# Altium footprint library basicfootprints.PcbLib: 522 footprints (part 4 of 33)
Each footprint in its own frame and in the unit in brackets; x right, y up, seen from the top. Pads: shape width x height; smd on the part's side, far side on the other; paste and mask are expansions set on the pad; w line width, h text height; cw(c..) or ccw(c..) is an arc to the next point about the centre after c.
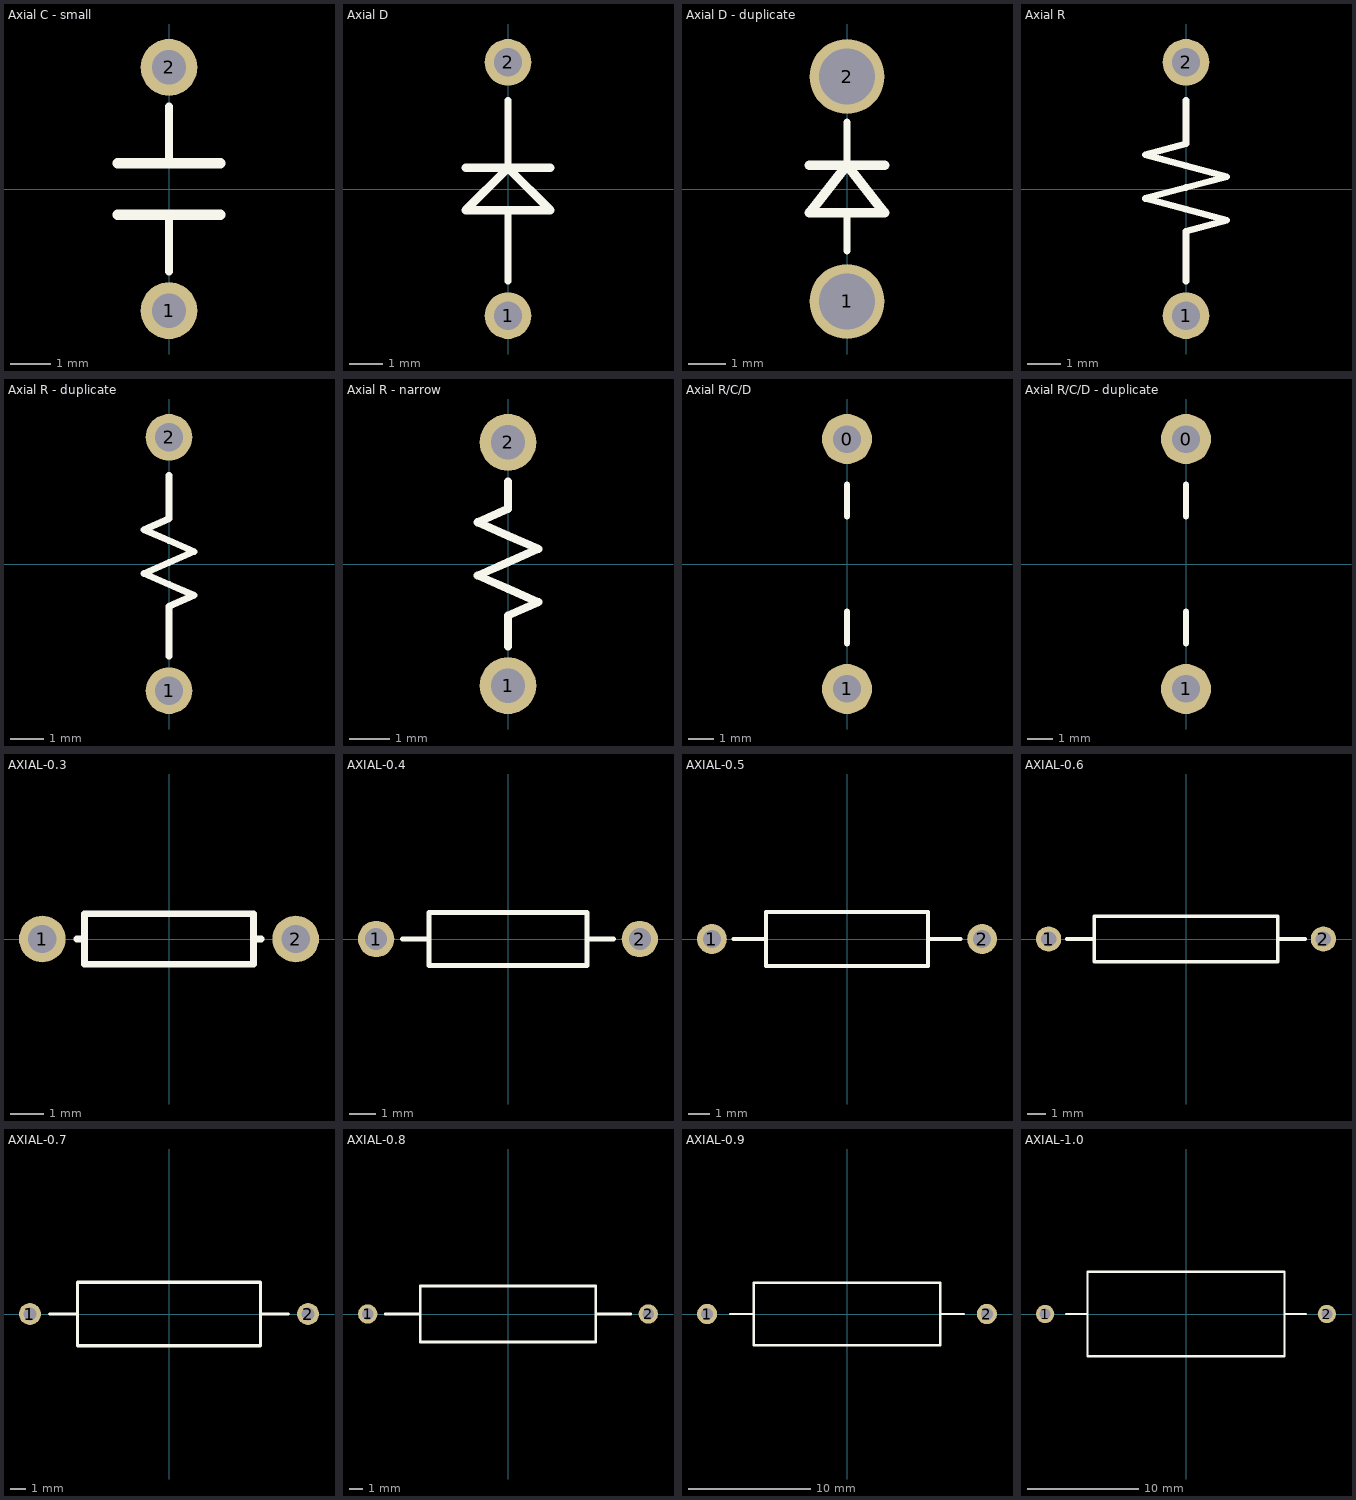
[diagram p3: the footprints below, top view; thin cyan lines are the x and y axes]

## Axial C - small [mm]
pads (2):
  round 1.4 hole 0.85: 1(0,-3) 2(0,3)
Top Overlay:
  lines w0.2: 0,-2.032 0,-0.635 ; 0,0.635 0,2.032
  lines w0.254: -1.27,-0.635 1.27,-0.635 ; -1.27,0.635 1.27,0.635

## Axial D [mm]
pads (2):
  round 1.4 hole 0.85: 1(0,-3.81) 2(0,3.81)
Top Overlay:
  lines w0.2: 0,-2.769 0,-0.635 ; 0,0.635 0,2.667
  lines w0.254: -1.27,0.635 1.27,0.635 ; -1.27,-0.635 0,0.635 1.27,-0.635 -1.27,-0.635

## Axial D - duplicate [mm]
pads (2):
  round 2 hole 1.5: 1(0,-3) 2(0,3)
Top Overlay:
  lines w0.2: 0,-1.651 0,-0.635 ; 0,0.635 0,1.778
  lines w0.254: -1,0.635 1,0.635 ; -1,-0.635 0,0.635 1,-0.635 -1,-0.635

## Axial R [mm]
pads (2):
  round 1.4 hole 0.85: 1(0,-3.81) 2(0,3.81)
Top Overlay:
  lines w0.2: 0,-2.769 0,-1.27 1.227,-0.941 0,-0.613 -1.227,-0.284 0,0.045 1.227,0.373 0,0.702 -1.227,1.031 0,1.36 0,2.667

## Axial R - duplicate [mm]
pads (2):
  round 1.4 hole 0.85: 1(0,-3.81) 2(0,3.81)
Top Overlay:
  lines w0.2: 0,-2.769 0,-1.27 0.75,-0.941 0,-0.613 -0.75,-0.284 0,0.045 0.75,0.373 0,0.702 -0.75,1.031 0,1.36 0,2.667

## Axial R - narrow [mm]
pads (2):
  round 1.4 hole 0.85: 1(0,-3) 2(0,3)
Top Overlay:
  lines w0.2: 0,-2.032 0,-1.27 0.75,-0.941 0,-0.613 -0.75,-0.284 0,0.045 0.75,0.373 0,0.702 -0.75,1.031 0,1.36 0,2.032

## Axial R/C/D [mm] "Through-Hole FootPrint"
pads (2):
  round 2 hole 1.1: 0(0,5) 1(0,-5)
Top Overlay:
  lines w0.254: 0,-3.175 0,-1.905 ; 0,1.905 0,3.175

## Axial R/C/D - duplicate [mm] "Through-Hole FootPrint"
pads (2):
  round 2 hole 1.1: 0(0,5) 1(0,-5)
Top Overlay:
  lines w0.254: 0,-3.175 0,-1.905 ; 0,1.905 0,3.175

## AXIAL-0.3 [mm] "Axial Device, Thru-Hole; 2 Leads; 0.3 in Pin Spacing"
height 1.524
pads (2):
  round 1.4 hole 0.85: 1(-3.81,0) 2(3.81,0)
Top Overlay:
  lines w0.2: -2.769,0 -2.54,0 ; 2.769,0 2.54,0 ; 2.54,0 2.54,-0.762 -2.54,-0.762 -2.54,0.762 2.54,0.762 2.54,0

## AXIAL-0.4 [mm] "Axial Device, Thru-Hole; 2 Leads; 0.4 in Pin Spacing"
height 2.032
pads (2):
  round 1.4 hole 0.85: 1(-5.08,0) 2(5.08,0)
Top Overlay:
  lines w0.2: -4.064,0 -3.048,0 ; 3.048,0 4.064,0 ; -3.048,-1.016 3.048,-1.016 3.048,1.016 -3.048,1.016 -3.048,-1.016

## AXIAL-0.5 [mm] "Axial Device, Thru-Hole; 2 Leads; 0.5 in Pin Spacing"
height 2.54
pads (2):
  round 1.4 hole 0.85: 1(-6.35,0) 2(6.35,0)
Top Overlay:
  lines w0.2: -5.334,0 -3.81,0 ; 3.81,0 5.334,0 ; -3.81,-1.27 -3.81,1.27 3.81,1.27 3.81,-1.27 -3.81,-1.27

## AXIAL-0.6 [mm] "Axial Device, Thru-Hole; 2 Leads; 0.6 in Pin Spacing"
height 2.54
pads (2):
  round 1.4 hole 0.85: 1(-7.62,0) 2(7.62,0)
Top Overlay:
  lines w0.2: -6.604,0 -5.08,0 ; 5.08,0 6.604,0 ; -5.08,-1.27 -5.08,1.27 5.08,1.27 5.08,-1.27 -5.08,-1.27

## AXIAL-0.7 [mm] "Axial Device, Thru-Hole; 2 Leads; 0.7 in Pin Spacing"
height 4.064
pads (2):
  round 1.4 hole 0.85: 1(-8.89,0) 2(8.89,0)
Top Overlay:
  lines w0.2: -7.62,0 -5.842,0 ; 5.842,0 7.62,0 ; -5.842,-2.032 5.842,-2.032 5.842,2.032 -5.842,2.032 -5.842,-2.032

## AXIAL-0.8 [mm] "Axial Device, Thru-Hole; 2 Leads; 0.8 in Pin Spacing"
height 4.064
pads (2):
  round 1.4 hole 0.85: 1(-10.16,0) 2(10.16,0)
Top Overlay:
  lines w0.2: -8.89,0 -6.35,0 ; 6.35,0 8.89,0 ; -6.35,-2.032 -6.35,2.032 6.35,2.032 6.35,-2.032 -6.35,-2.032

## AXIAL-0.9 [mm] "Axial Device, Thru-Hole; 2 Leads; 0.9 in Pin Spacing"
height 5.08
pads (2):
  round 1.65 hole 1: 1(-11.43,0) 2(11.43,0)
Top Overlay:
  lines w0.2: -9.525,0 -7.62,0 ; 7.62,0 9.525,0 ; -7.62,-2.54 7.62,-2.54 7.62,2.54 -7.62,2.54 -7.62,-2.54

## AXIAL-1.0 [mm] "Axial Device, Thru-Hole; 2 Leads; 1.0 in Pin Spacing"
height 7.62
pads (2):
  round 1.65 hole 1: 1(-12.7,0) 2(12.7,0)
Top Overlay:
  lines w0.2: -10.795,0 -8.89,0 ; 8.89,0 10.795,0 ; -8.89,-3.81 -8.89,3.81 8.89,3.81 8.89,-3.81 -8.89,-3.81